# Altium footprint library amirlib.PcbLib: 456 footprints (part 23 of 29)
Each footprint in its own frame and in the unit in brackets; x right, y up, seen from the top. Pads: shape width x height; smd on the part's side, far side on the other; paste and mask are expansions set on the pad; w line width, h text height; cw(c..) or ccw(c..) is an arc to the next point about the centre after c.
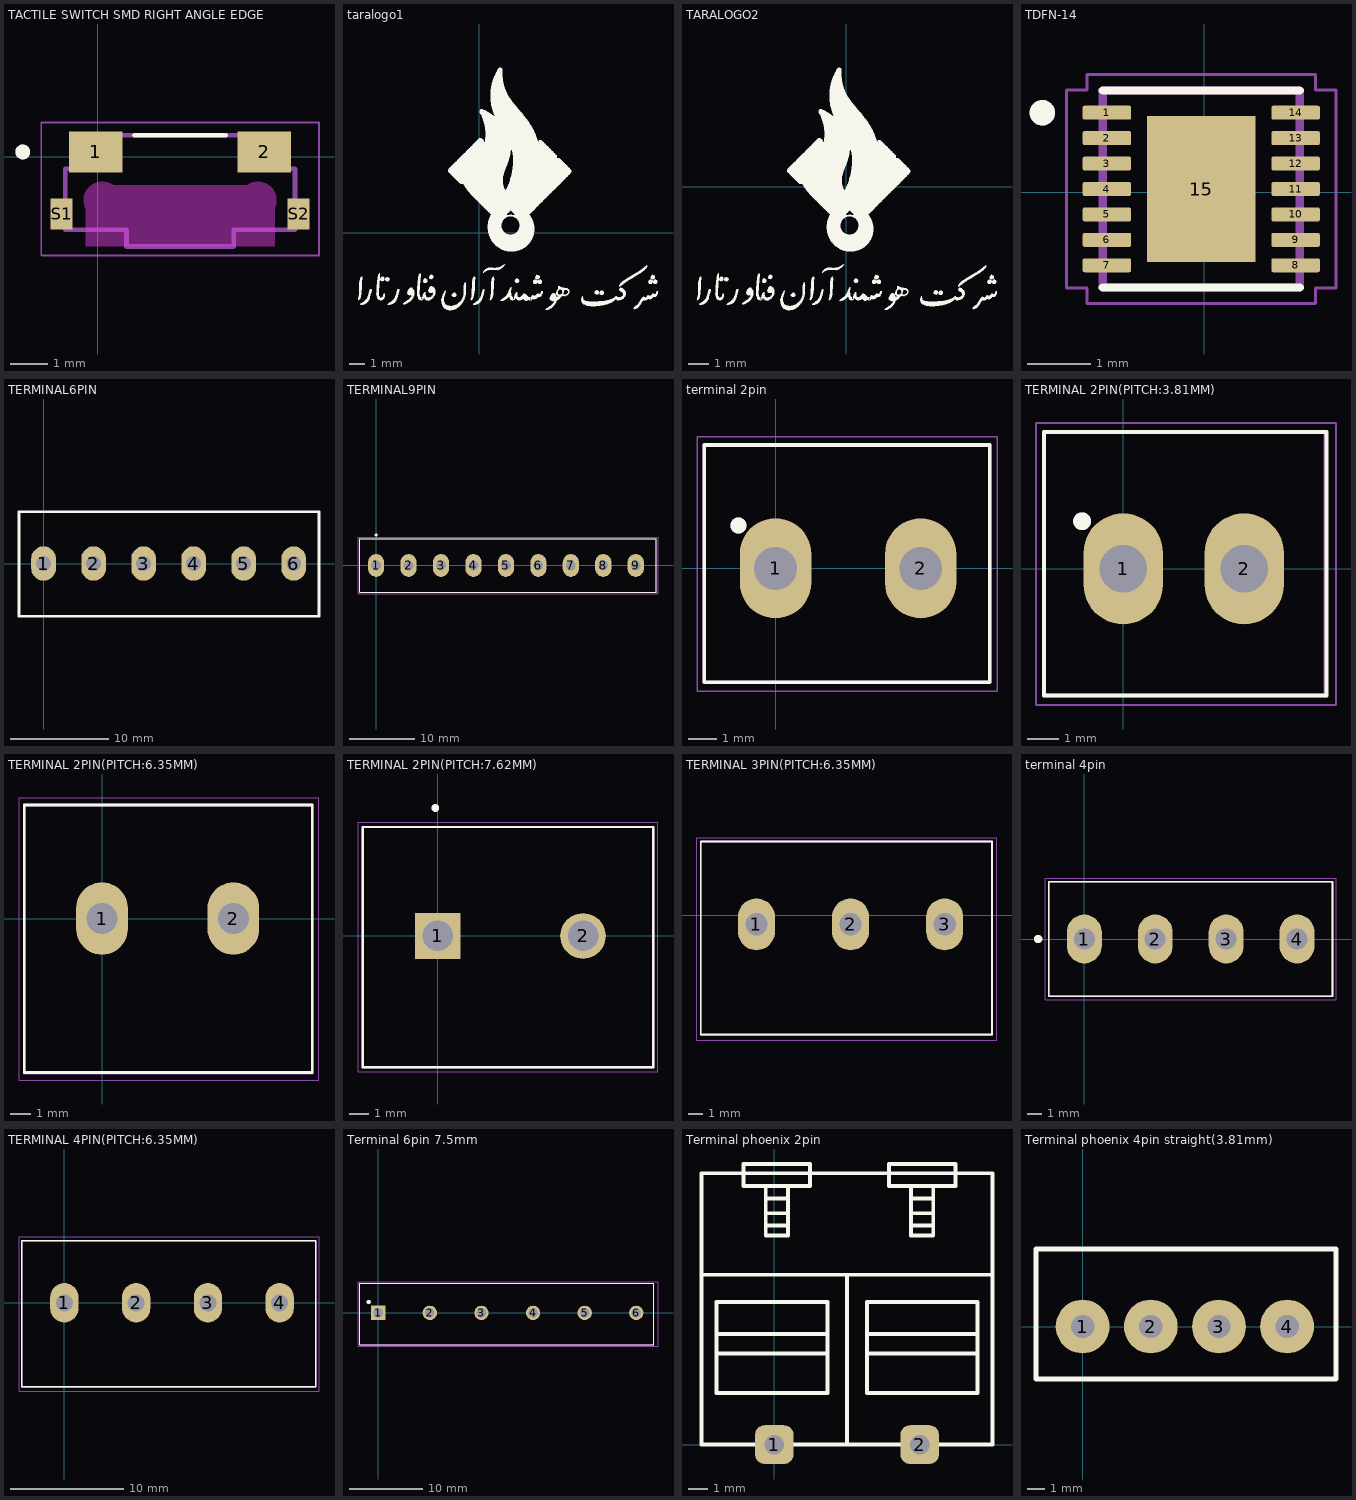
[diagram p22: the footprints below, top view; thin cyan lines are the x and y axes]

## TACTILE SWITCH SMD RIGHT ANGLE EDGE [mm]
pads (4):
  rect 1.45x1.1 smd: 1(-0.05,0.125) 2(4.5,0.125)
  rect 0.6x0.85 smd: S1(-0.975,-1.55) S2(5.425,-1.55)
Top Overlay:
  circle w0.2: c-2.025,0.125 r0.1
  lines w0.127: 0.995,0.575 3.455,0.575
Keep-Out Layer:
  board cut-out: -0.325,-1.4 -0.325,-2.425 4.775,-2.425 4.775,-1.4 4.794,-1.357 4.808,-1.314 4.818,-1.271 4.825,-1.227 4.827,-1.182 4.825,-1.137 4.82,-1.093 4.81,-1.049 4.797,-1.007 4.78,-0.965 4.759,-0.926 4.735,-0.888 4.708,-0.853 4.677,-0.82 4.644,-0.79 4.609,-0.763 4.571,-0.74 4.531,-0.72 4.489,-0.703 4.446,-0.69 4.403,-0.682 4.358,-0.677 4.314,-0.676 4.269,-0.679 4.225,-0.686 4.182,-0.696 4.139,-0.711 4.099,-0.729 4.06,-0.751 4.025,-0.775 0.425,-0.775 0.39,-0.751 0.351,-0.729 0.311,-0.711 0.268,-0.696 0.225,-0.686 0.181,-0.679 0.136,-0.676 0.092,-0.677 0.047,-0.682 0.004,-0.69 -0.039,-0.703 -0.081,-0.72 -0.121,-0.74 -0.159,-0.763 -0.194,-0.79 -0.227,-0.82 -0.258,-0.853 -0.285,-0.888 -0.309,-0.926 -0.33,-0.965 -0.347,-1.007 -0.36,-1.049 -0.37,-1.093 -0.375,-1.137 -0.377,-1.182 -0.375,-1.227 -0.368,-1.271 -0.358,-1.314 -0.344,-1.357
Mechanical 13:
  circle w0.2: c-2.025,0.125 r0.1
  lines w0.127: -0.875,-1.975 -0.875,-0.325 -0.625,-0.325 -0.625,0.575 5.075,0.575 5.075,-0.325 5.325,-0.325 5.325,-1.975 3.675,-1.975 3.675,-2.425 0.775,-2.425 0.775,-1.975 -0.875,-1.975
Mechanical 15:
  lines w0.05: -1.525,-2.675 5.975,-2.675 5.975,0.925 -1.525,0.925 -1.525,-2.675
3D body "step_temp.STEP": height 1.4, standoff -2.2, extent -0.875,-2.425 5.325,0.575

## taralogo1 [mm]
Top Overlay:
  drawing of 30 lines, arcs and shapes, not listed

## TARALOGO2 [mm]
Top Overlay:
  drawing of 30 lines, arcs and shapes, not listed

## TDFN-14 [mm]
pads (15):
  rrect25% 0.76x0.22 smd: 1(-1.536,1.251) 2(-1.536,0.851) 3(-1.536,0.451) 4(-1.536,0.051) 5(-1.536,-0.349) 6(-1.536,-0.749) 7(-1.536,-1.149) 8(1.434,-1.149) 9(1.434,-0.749) 10(1.434,-0.349) 11(1.434,0.051) 12(1.434,0.451) 13(1.434,0.851) 14(1.434,1.251)
  rect 1.7x2.3 smd paste-2: 15(-0.051,0.051)
Top Overlay:
  circle w0.2: c-2.551,1.251 r0.1
  lines w0.127: -1.601,-1.499 1.499,-1.499 ; -1.601,1.601 1.499,1.601
Top Paste:
  region: 0.614,-0.914 0.044,-0.914 0.044,-0.044 0.614,-0.044
  region: 0.614,0.146 0.044,0.146 0.044,1.016 0.614,1.016
  region: -0.146,-0.914 -0.716,-0.914 -0.716,-0.044 -0.146,-0.044
  region: -0.146,0.146 -0.716,0.146 -0.716,1.016 -0.146,1.016
Mechanical 13:
  circle w0.2: c-2.551,1.251 r0.1
  lines w0.127: -1.601,-1.499 1.499,-1.499 1.499,1.601 -1.601,1.601 -1.601,-1.499
Mechanical 15:
  lines w0.05: -2.171,-1.509 -2.171,1.611 -1.851,1.611 -1.851,1.851 1.749,1.851 1.749,1.611 2.069,1.611 2.069,-1.509 1.749,-1.509 1.749,-1.749 -1.851,-1.749 -1.851,-1.509 -2.171,-1.509
3D body "step_temp.STEP": height 0.8, standoff 0, extent -1.551,-1.449 1.449,1.551

## TERMINAL6PIN [mm]
pads (6):
  oval 2.5x3.5 hole 1.5: 1(0,0) 2(5.08,0) 3(10.16,0) 4(15.24,0) 5(20.32,0) 6(25.4,0)
Top Overlay:
  lines w0.254: -2.493,-5.35 27.975,-5.35 27.975,5.25 -2.493,5.252 -2.493,-5.35
3D body "User Library-TER-KF128-3P.STEP": height 14.85, standoff -4.45, extent 12.08,-5.275 27.92,5.225
3D body "User Library-TER-KF128-3P.STEP": height 14.85, standoff -4.45, extent -3.065,-5.275 12.775,5.225

## TERMINAL9PIN [mm]
pads (9):
  oval 2.5x3.5 hole 1.5: 1(0,0) 2(5,0) 3(10,0) 4(15,0) 5(20,0) 6(25,0) 7(30,0) 8(35,0) 9(40,0)
Top Overlay:
  circle w0.2: c0,4.7 r0.1
  lines w0.127: -2.54,-4.1 -2.54,4.1 43.18,4.1 43.18,-4.1 -2.54,-4.1
Mechanical 13:
  circle w0.2: c0,4.7 r0.1
  lines w0.127: -2.54,-4.1 -2.54,4.1 43.18,4.1 43.18,-4.1 -2.54,-4.1
Mechanical 15:
  lines w0.05: -2.79,-4.35 -2.79,4.35 43.43,4.35 43.43,-4.35 -2.79,-4.35
3D body "terminal_blocks_a-tb500-to09.stp": height 10.02, standoff -3.78, extent -2.555,-4.005 43.043,4.293

## terminal 2pin [mm]
pads (2):
  oval 2.5x3.5 hole 1.5: 1(0,0) 2(5.08,0)
Top Overlay:
  circle w0.28: c-1.3,1.5 r0.14
  lines w0.127: -2.5,-3.988 -2.5,4.318 7.5,4.318 7.5,-3.988 -2.5,-3.988
Mechanical 13:
  circle w0.28: c-1.3,1.5 r0.14
  lines w0.127: -2.5,-3.988 7.5,-3.988 7.5,4.318 -2.5,4.318 -2.5,-3.988
Mechanical 15:
  lines w0.05: -2.75,-4.293 -2.75,4.597 7.75,4.597 7.75,-4.293 -2.75,-4.293
3D body "1935161--3DModel-STEP-56544.STEP": height 11.5, standoff -3.4, extent -2.871,-3.913 7.529,5.087

## TERMINAL 2PIN(PITCH:3.81MM) [mm]
pads (2):
  oval 2.5x3.5 hole 1.5: 1(0,0) 2(3.81,0)
Top Overlay:
  circle w0.28: c-1.3,1.5 r0.14
  lines w0.127: -2.5,-3.988 -2.5,4.318 6.401,4.318 6.401,-3.988 -2.5,-3.988
Mechanical 13:
  circle w0.28: c-1.3,1.5 r0.14
  lines w0.127: -2.5,-3.988 6.375,-3.988 6.375,4.318 -2.5,4.318 -2.5,-3.988
Mechanical 15:
  lines w0.05: -2.75,-4.293 -2.75,4.597 6.706,4.597 6.706,-4.293 -2.75,-4.293

## TERMINAL 2PIN(PITCH:6.35MM) [mm]
pads (2):
  oval 2.5x3.5 hole 1.5: 1(0,0) 2(6.35,0)
Top Overlay:
  lines w0.127: -3.759,-7.442 -3.759,5.486 10.16,5.486 10.16,-7.442 -3.759,-7.442
Mechanical 13:
  circle w0.3: c0,0 r0.15
  lines w0.127: -3.759,-7.468 -3.759,5.486 10.16,5.486 10.16,-7.468 -3.759,-7.468
Mechanical 15:
  lines w0.05: -4.013,-7.823 10.49,-7.823 10.49,5.842 -4.013,5.842 -4.013,-7.823

## TERMINAL 2PIN(PITCH:7.62MM) [mm]
pads (2):
  rect 2.4x2.4 hole 1.6: 1(0,0)
  round 2.4 hole 1.6: 2(7.62,0)
Top Overlay:
  circle w0.2: c-0.127,6.716 r0.1
  lines w0.127: -3.937,-6.884 11.303,-6.884 11.303,5.716 -3.937,5.716 -3.937,-6.884
Mechanical 13:
  circle w0.2: c-0.127,6.716 r0.1
  lines w0.127: -3.937,-6.884 11.303,-6.884 11.303,5.716 -3.937,5.716 -3.937,-6.884
Mechanical 15:
  lines w0.05: -4.187,-7.134 11.553,-7.134 11.553,5.966 -4.187,5.966 -4.187,-7.134
3D body "User Library-KF762-2p.STEP": height 21.58, standoff -4.82, extent -4.087,-7.112 11.453,5.738

## TERMINAL 3PIN(PITCH:6.35MM) [mm]
pads (3):
  oval 2.5x3.5 hole 1.5: 1(-36.678,-0.61) 2(-30.328,-0.61) 3(-23.978,-0.61)
Top Overlay:
  lines w0.127: -40.437,-8.052 -20.777,-8.052 -20.777,4.978 -40.437,4.978 -40.437,-8.052
Mechanical 13:
  circle w0.3: c-36.678,-0.61 r0.15
  lines w0.127: -40.437,-8.077 -20.777,-8.077 -20.777,4.978 -40.437,4.978 -40.437,-8.077
Mechanical 15:
  lines w0.05: -40.691,-8.433 -40.691,5.232 -20.447,5.232 -20.447,-8.433 -40.691,-8.433
3D body "kf635 3pin.stp": height 21.5, standoff -4.8, extent -40.473,-7.91 -20.843,4.99

## terminal 4pin [mm]
pads (4):
  oval 2.5x3.5 hole 1.5: 1(0,0) 2(5.08,0) 3(10.16,0) 4(15.24,0)
Top Overlay:
  circle w0.3: c-3.31,0 r0.15
  lines w0.127: -2.54,-4.1 -2.54,4.1 17.78,4.1 17.78,-4.1 -2.54,-4.1
Mechanical 13:
  circle w0.3: c0,0 r0.15
  lines w0.127: -2.54,-4.1 -2.54,4.1 17.78,4.1 17.78,-4.1 -2.54,-4.1
Mechanical 15:
  lines w0.05: -2.79,-4.35 18.03,-4.35 18.03,4.35 -2.79,4.35 -2.79,-4.35
3D body "step_temp.STEP": height 10.25, standoff -3.25, extent -3.14,-4.064 17.78,4.136

## TERMINAL 4PIN(PITCH:6.35MM) [mm]
pads (4):
  oval 2.5x3.5 hole 1.5: 1(0,0) 2(6.35,0) 3(12.7,0) 4(19.05,0)
Top Overlay:
  lines w0.127: -3.759,-7.442 22.25,-7.442 22.25,5.486 -3.759,5.486 -3.759,-7.442
Mechanical 13:
  circle w0.3: c0,0 r0.15
  lines w0.127: -3.759,-7.468 22.25,-7.468 22.25,5.486 -3.759,5.486 -3.759,-7.468
Mechanical 15:
  lines w0.05: -4.013,-7.823 -4.013,5.842 22.53,5.842 22.53,-7.823 -4.013,-7.823
3D body "kf635 4pin.stp": height 21.5, standoff -4.8, extent -3.78,-7.402 22.2,5.498

## Terminal 6pin 7.5mm [mm] "pin gap:7.5mm"
pads (6):
  rect 1.95x1.95 hole 1.3: 1(0,0)
  round 1.95 hole 1.3: 2(7,0) 3(14,0) 4(21,0) 5(28,0) 6(35,0)
Top Overlay:
  circle w0.28: c-1.3,1.5 r0.14
  lines w0.127: -2.5,-4.3 -2.5,4 37.35,4 37.35,-4.3 -2.5,-4.3
Mechanical 13:
  circle w0.28: c-1.3,1.5 r0.14
  lines w0.127: -2.5,-4.3 37.35,-4.3 37.35,4 -2.5,4 -2.5,-4.3
Mechanical 15:
  lines w0.05: -2.75,-4.55 -2.75,4.25 37.95,4.25 37.95,-4.55 -2.75,-4.55

## Terminal phoenix 2pin [mm]
pads (2):
  rrect50% 2x2 hole 1: 1(0,0) 2(7.5,0)
Top Overlay:
  lines w0.2: -2.974,4.699 2.741,4.699 ; -2.974,5.715 2.741,5.715 ; -0.441,11.938 0.702,11.938 ; -0.441,12.7 0.702,12.7 ; -0.441,13.208 -0.441,10.795 0.702,10.795 0.702,13.335 ; -0.314,11.303 0.702,11.303 ; 3.75,0 3.75,8.763 ; 4.773,4.699 10.488,4.699 ; 4.773,5.715 10.488,5.715 ; 7.059,11.938 8.202,11.938 ; 7.059,12.7 8.202,12.7 ; 7.059,13.208 7.059,10.795 8.202,10.795 8.202,13.335 ; 7.186,11.303 8.202,11.303 ; 11.25,8.763 -3.75,8.763 -3.75,0 ; -3.75,0 11.25,0 11.25,14 -3.75,14 -3.75,0 ; -2.974,2.667 2.741,2.667 2.741,7.366 -2.974,7.366 -2.974,2.667 ; -1.584,13.335 1.845,13.335 1.845,14.478 -1.584,14.478 -1.584,13.335 ; 4.773,2.667 4.773,7.366 10.488,7.366 10.488,2.667 4.773,2.667 ; 5.916,13.335 5.916,14.478 9.345,14.478 9.345,13.335 5.916,13.335

## Terminal phoenix 4pin straight(3.81mm) [mm]
pads (4):
  round 3 hole 1.3: 1(0,0) 2(3.8,0) 3(7.6,0) 4(11.4,0)
Top Overlay:
  lines w0.254: -2.6,-2.925 14.125,-2.925 14.125,4.325 -2.6,4.325 -2.6,-2.925
3D body "Phoenix Contact 3.81mm Pluggable Terminal Block.SLDPRT": height 7.25, standoff -3.25, extent -2.48,-2.8 6.53,4.2
3D body "Phoenix Contact 3.81mm Pluggable Terminal Block.SLDPRT": height 7.25, standoff -3.25, extent 4.995,-2.8 14.005,4.2